# Altium footprint library Footprint.PcbLib: 411 footprints (part 2 of 26)
Each footprint in its own frame and in the unit in brackets; x right, y up, seen from the top. Pads: shape width x height; smd on the part's side, far side on the other; paste and mask are expansions set on the pad; w line width, h text height; cw(c..) or ccw(c..) is an arc to the next point about the centre after c.
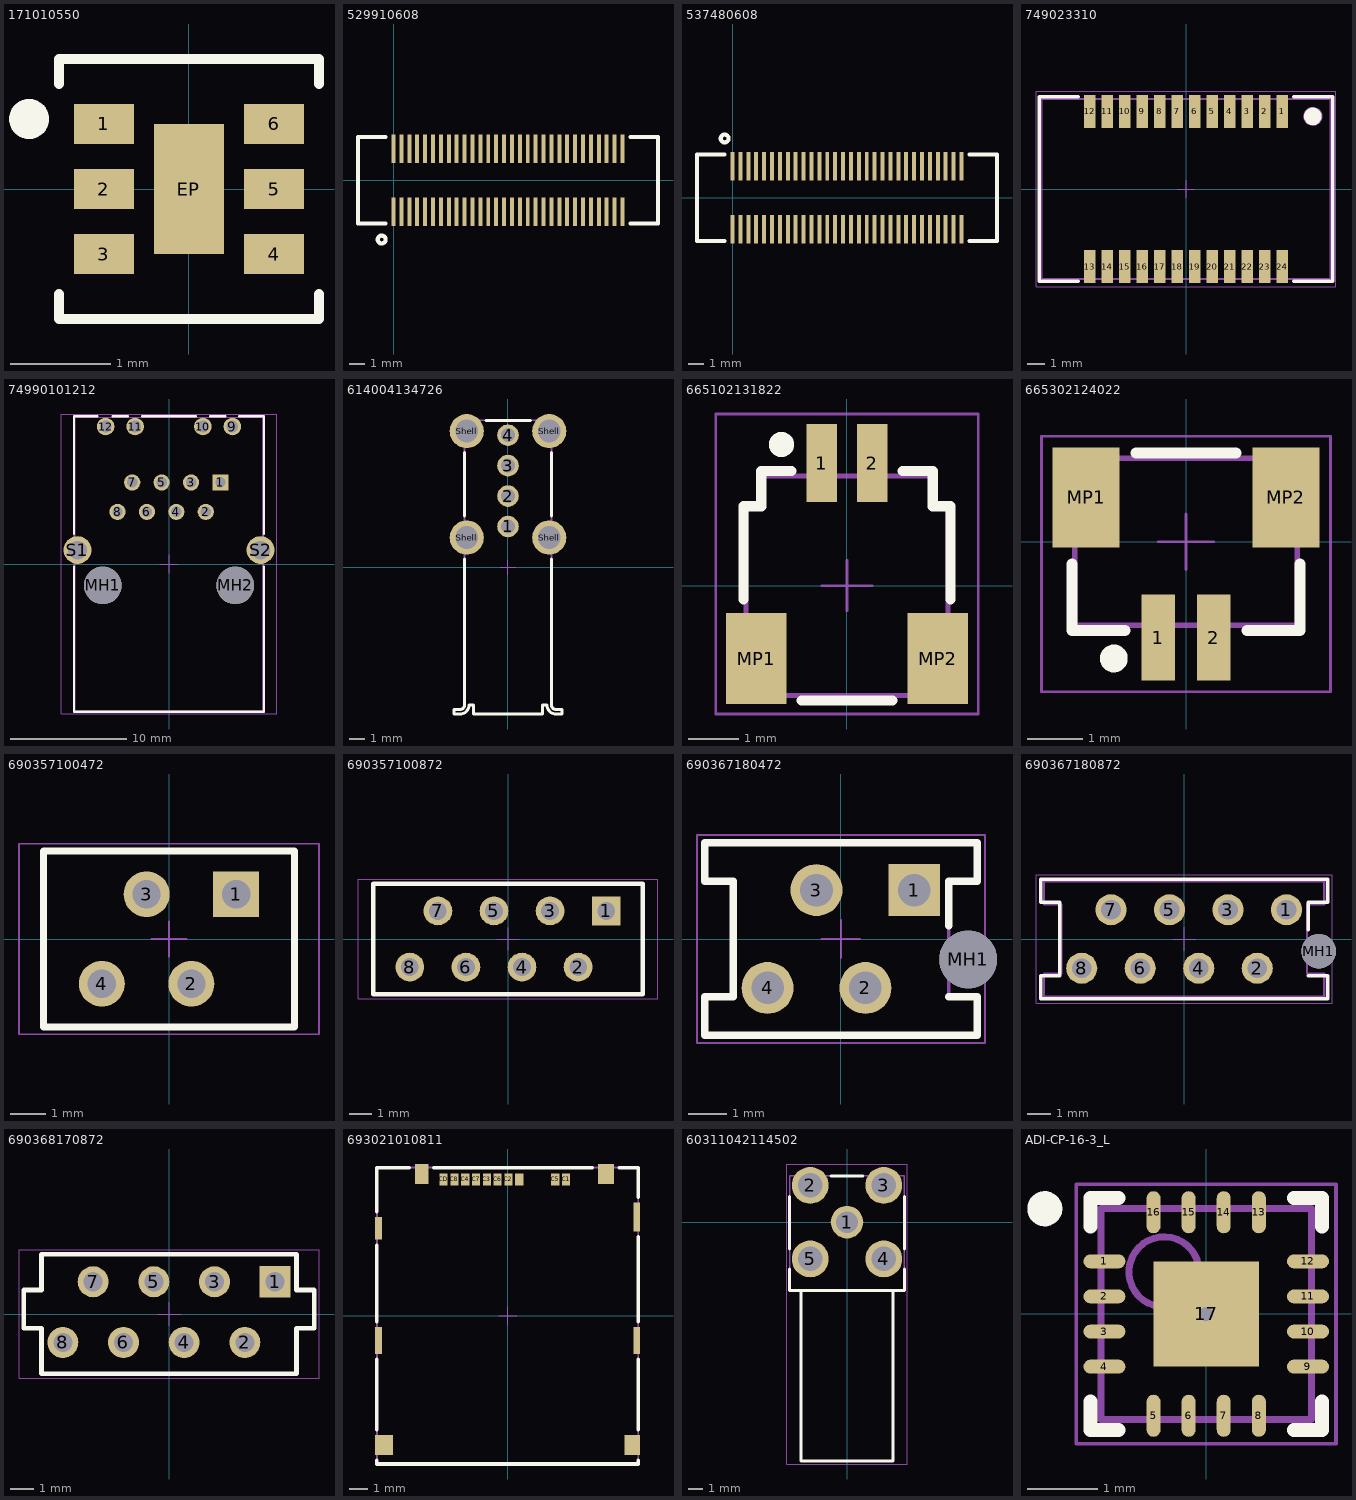
[diagram p1: the footprints below, top view; thin cyan lines are the x and y axes]

## 171010550 [mm] "Variable Step Down MicroModule, body 2.5x2.5mm"
height 1.21
pads (7):
  rect 0.6x0.4 smd: 1(-0.85,0.65) 2(-0.85,0) 3(-0.85,-0.65) 4(0.85,-0.65) 5(0.85,0) 6(0.85,0.65)
  rect 0.7x1.3 smd: EP(0,0)
Top Overlay:
  circle w0.2: c-1.6,0.7 r0.1
  lines w0.1: -1.3,-1.05 -1.3,-1.3 1.3,-1.3 1.3,-1.05 ; -1.3,1.05 -1.3,1.3 1.3,1.3 1.3,1.05
3D body "171010550 (rev1).stp": height 1.21, standoff 0, extent -1.25,-1.25 1.25,1.25

## 529910608 [mm]
pads (60):
  rect 0.25x1.8 smd: 1(0,-2) 2(0,2) 3(0.5,-2) 4(0.5,2) 5(1,-2) 6(1,2) 7(1.5,-2) 8(1.5,2) 9(2,-2) 10(2,2) 11(2.5,-2) 12(2.5,2) 13(3,-2) 14(3,2) 15(3.5,-2) 16(3.5,2) 17(4,-2) 18(4,2) 19(4.5,-2) 20(4.5,2) 21(5,-2) 22(5,2) 23(5.5,-2) 24(5.5,2) 25(6,-2) 26(6,2) 27(6.5,-2) 28(6.5,2) 29(7,-2) 30(7,2) 31(7.5,-2) 32(7.5,2) 33(8,-2) 34(8,2) 35(8.5,-2) 36(8.5,2) 37(9,-2) 38(9,2) 39(9.5,-2) 40(9.5,2) 41(10,-2) 42(10,2) 43(10.5,-2) 44(10.5,2) 45(11,-2) 46(11,2) 47(11.5,-2) 48(11.5,2) 49(12,-2) 50(12,2) 51(12.5,-2) 52(12.5,2) 53(13,-2) 54(13,2) 55(13.5,-2) 56(13.5,2) 57(14,-2) 58(14,2) 59(14.5,-2) 60(14.5,2)
Top Overlay:
  circle w0.254: c-0.75,-3.75 r0.25
  lines w0.254: -0.5,-2.75 -2.25,-2.75 -2.25,2.75 -0.5,2.75 ; 15,-2.75 16.75,-2.75 16.75,2.75 15,2.75
3D body "529910608.stp": height 2.28, standoff -0.01, extent -2.15,-2.7 16.65,2.7

## 537480608 [mm]
pads (60):
  rect 0.25x1.8 smd: 1(0,2) 2(0,-2) 3(0.5,2) 4(0.5,-2) 5(1,2) 6(1,-2) 7(1.5,2) 8(1.5,-2) 9(2,2) 10(2,-2) 11(2.5,2) 12(2.5,-2) 13(3,2) 14(3,-2) 15(3.5,2) 16(3.5,-2) 17(4,2) 18(4,-2) 19(4.5,2) 20(4.5,-2) 21(5,2) 22(5,-2) 23(5.5,2) 24(5.5,-2) 25(6,2) 26(6,-2) 27(6.5,2) 28(6.5,-2) 29(7,2) 30(7,-2) 31(7.5,2) 32(7.5,-2) 33(8,2) 34(8,-2) 35(8.5,2) 36(8.5,-2) 37(9,2) 38(9,-2) 39(9.5,2) 40(9.5,-2) 41(10,2) 42(10,-2) 43(10.5,2) 44(10.5,-2) 45(11,2) 46(11,-2) 47(11.5,2) 48(11.5,-2) 49(12,2) 50(12,-2) 51(12.5,2) 52(12.5,-2) 53(13,2) 54(13,-2) 55(13.5,2) 56(13.5,-2) 57(14,2) 58(14,-2) 59(14.5,2) 60(14.5,-2)
Top Overlay:
  circle w0.254: c-0.5,3.75 r0.25
  lines w0.254: -0.5,-2.75 -2.25,-2.75 -2.25,2.75 -0.5,2.75 ; 15,-2.75 16.75,-2.75 16.75,2.75 15,2.75
3D body "537480608.stp": height 2.4, standoff -0.02, extent -2.15,-2.15 16.65,2.15

## 749023310 [mm] "SMT Transformer, body 16.5x10.3mm"
height 4.1
pads (24):
  rect 0.64x1.88 smd: 1(5.5,4.44) 2(4.5,4.44) 3(3.5,4.44) 4(2.5,4.44) 5(1.5,4.44) 6(0.5,4.44) 7(-0.5,4.44) 8(-1.5,4.44) 9(-2.5,4.44) 10(-3.5,4.44) 11(-4.5,4.44) 12(-5.5,4.44) 13(-5.5,-4.44) 14(-4.5,-4.44) 15(-3.5,-4.44) 16(-2.5,-4.44) 17(-1.5,-4.44) 18(-0.5,-4.44) 19(0.5,-4.44) 20(1.5,-4.44) 21(2.5,-4.44) 22(3.5,-4.44) 23(4.5,-4.44) 24(5.5,-4.44)
Top Overlay:
  circle w0.5: c7.25,4.15 r0.25
  lines w0.2: -6.15,-5.275 -8.375,-5.275 -8.375,5.275 -6.15,5.275 ; 6.15,-5.275 8.375,-5.275 8.375,5.275 6.15,5.275
Mechanical 11:
  circle w0.1: c7.25,4.15 r0.5
  lines w0.1: -8.25,-5.15 8.25,-5.15 8.25,5.15 -8.25,5.15 -8.25,-5.15
  text ".Designator" at -2.5,-0.75 h1.5
Mechanical 15:
  lines w0.05: -0.5,0 0.5,0 ; 0,-0.5 0,0.5 ; -8.575,-5.58 -8.575,5.58 8.575,5.58 8.575,-5.58 -8.575,-5.58
3D body "749023310.stp": height 4.1, standoff 0, extent -8.25,-5.15 8.25,5.15

## 74990101212 [mm] "LAN Transformer, body 25.3x16.2mm"
height 13.5
pads (16):
  rect 1.4x1.4 hole 0.9: 1(4.445,7.04)
  round 1.4 hole 0.9: 2(3.175,4.5) 3(1.905,7.04) 4(0.635,4.5) 5(-0.635,7.04) 6(-1.905,4.5) 7(-3.175,7.04) 8(-4.445,4.5)
  round 1.52 hole 1.02: 9(5.465,11.87) 10(2.925,11.87) 11(-2.925,11.87) 12(-5.465,11.87)
  round 3.25 hole 3.25 unplated: MH1(-5.715,-1.85) MH2(5.715,-1.85)
  round 2.4 hole 1.6: S1(-7.9,1.2) S2(7.9,1.2)
Top Overlay:
  lines w0.2: -8.2,-0.23 -8.2,-12.75 8.2,-12.75 8.2,-0.23 ; -8.2,2.61 -8.2,12.75 -6.18,12.75 ; -4.86,12.75 -3.54,12.75 ; -2.32,12.75 2.32,12.75 ; 3.54,12.75 4.86,12.75 ; 6.06,12.75 8.2,12.75 8.2,2.61
Mechanical 11:
  lines w0.1: -8.1,-12.65 -8.1,12.65 8.1,12.65 8.1,-12.65 -8.1,-12.65
  text ".Designator" at 0,0 h1
Mechanical 13:
  lines w0.1: -8.2,-12.65 -8.2,12.65 8.2,12.65 8.2,-12.65 -8.2,-12.65
Mechanical 15:
  lines w0.1: -0.8,0 0.8,0 ; 0,-0.8 0,0.8 ; -9.3,-12.95 9.3,-12.95 9.3,12.95 -9.3,12.95 -9.3,-12.95
3D body "74990101212.stp": height 13.61, standoff -3.79, extent -8.2,-12.65 8.2,12.65

## 614004134726 [mm] "USB 2.0 Type A Up Right"
height 14.5
pads (8):
  round 1.42 hole 0.92: 1(0,2.68) 2(0,4.68) 3(0,6.68) 4(0,8.68)
  round 2.25 hole 1.5: Shell(-2.71,1.95) Shell(-2.71,8.95) Shell(2.71,1.95) Shell(2.71,8.95)
Top Overlay:
  lines w0.2: -2.86,0.54 -2.86,-9.06 cw(c-3.15,-9.06) -3.15,-9.35 -3.55,-9.35 -3.55,-9.65 -3.15,-9.65 ccw(c-3.15,-9.06) -2.56,-9.06 -2.27,-9.06 -2.27,-9.65 2.27,-9.65 2.27,-9.06 2.56,-9.06 ccw(c3.15,-9.06) 3.15,-9.65 3.55,-9.65 3.55,-9.35 3.15,-9.35 cw(c3.15,-9.06) 2.86,-9.06 2.86,0.54 ; -2.86,3.36 -2.86,7.54 ; -1.46,9.65 1.49,9.65 ; 2.86,3.36 2.86,7.54
Mechanical 13:
  lines w0.1: -3.55,-9.65 -3.15,-9.65 ccw(c-3.15,-9.06) -2.56,-9.06 -2.27,-9.06 -2.27,-9.65 2.27,-9.65 2.27,-9.06 2.56,-9.06 ccw(c3.15,-9.06) 3.15,-9.65 3.55,-9.65 3.55,-9.35 3.15,-9.35 cw(c3.15,-9.06) 2.86,-9.06 2.86,9.65 -2.86,9.65 -2.86,-9.06 cw(c-3.15,-9.06) -3.15,-9.35 -3.55,-9.35 -3.55,-9.65
Mechanical 15:
  lines w0.05: -0.5,0 0.5,0 ; 0,-0.5 0,0.5
3D body "614004134726.stp": height 14.49, standoff -3.82, extent -3.55,-9.65 3.55,9.65

## 665102131822 [mm] "1.00 mm SMT Male Horizontal Shrouded, 2p"
height 3.1
pads (4):
  rect 0.6x1.55 smd: 1(-0.5,2.43) 2(0.5,2.43)
  rect 1.2x1.8 smd: MP1(-1.8,-1.445) MP2(1.8,-1.445)
Top Overlay:
  circle w0.25: c-1.3,2.8 r0.125
  lines w0.2: -2.05,-0.275 -2.05,1.575 -1.7,1.575 -1.7,2.275 -1.1,2.275 ; -0.9,-2.275 0.9,-2.275 ; 1.1,2.275 1.7,2.275 1.7,1.575 2.05,1.575 2.05,-0.275
Mechanical 13:
  lines w0.1: -2,-2.175 -2,1.575 -1.7,1.575 -1.7,2.175 1.7,2.175 1.7,1.575 2,1.575 2,-2.175 -2,-2.175
Mechanical 15:
  lines w0.05: -0.5,0 0.5,0 ; 0,-0.5 0,0.5 ; -2.6,-2.545 -2.6,3.405 2.6,3.405 2.6,-2.545 -2.6,-2.545
3D body "665102131822.stp": height 3.09, standoff -0.01, extent -2,-2.175 2,2.825

## 665302124022 [mm] "1.00 mm SMT Male Vertical Shrouded Header, 2p"
height 3.7
pads (4):
  rect 0.6x1.55 smd: 1(-0.5,-1.725) 2(0.5,-1.725)
  rect 1.2x1.8 smd: MP1(-1.8,0.8) MP2(1.8,0.8)
Top Overlay:
  circle w0.25: c-1.3,-2.1 r0.125
  lines w0.2: -2.05,-0.4 -2.05,-1.6 -1.1,-1.6 ; -0.9,1.6 0.9,1.6 ; 1.1,-1.6 2.05,-1.6 2.05,-0.4
Mechanical 13:
  lines w0.1: -2,-1.5 2,-1.5 2,1.5 -2,1.5 -2,-1.5
Mechanical 15:
  lines w0.05: -0.5,0 0.5,0 ; 0,-0.5 0,0.5 ; -2.6,-2.7 2.6,-2.7 2.6,1.9 -2.6,1.9 -2.6,-2.7
3D body "665302124022.stp": height 4.79, standoff -0.01, extent -2,-2.195 2,1.765

## 690357100472 [mm] "MiniModule Connectors, PCB Type, Male, THT, Vertical, 4p"
height 7.3
pads (4):
  rect 1.3x1.3 hole 0.8: 1(1.905,1.27)
  round 1.3 hole 0.8: 2(0.635,-1.27) 3(-0.635,1.27) 4(-1.905,-1.27)
Top Overlay:
  lines w0.2: -3.555,-2.5 3.555,-2.5 3.555,2.5 -3.555,2.5 -3.555,-2.5
Mechanical 13:
  lines w0.1: -3.555,-2.5 -3.555,2.5 3.555,2.5 3.555,-2.5 -3.555,-2.5
Mechanical 15:
  lines w0.05: -0.5,0 0.5,0 ; 0,-0.5 0,0.5 ; -4.255,-2.7 4.255,-2.7 4.255,2.7 -4.255,2.7 -4.255,-2.7
3D body "690357100472.stp": height 7.05, standoff -3.05, extent -4.055,-2.5 4.055,2.5

## 690357100872 [mm] "MiniModule Connectors, PCB Type, Male, THT, Vertical, 8p"
height 7.3
pads (8):
  rect 1.3x1.3 hole 0.8: 1(4.445,1.27)
  round 1.3 hole 0.8: 2(3.175,-1.27) 3(1.905,1.27) 4(0.635,-1.27) 5(-0.635,1.27) 6(-1.905,-1.27) 7(-3.175,1.27) 8(-4.445,-1.27)
Top Overlay:
  lines w0.2: -6.095,-2.5 -6.095,2.5 6.095,2.5 6.095,-2.5 -6.095,-2.5
Mechanical 13:
  lines w0.1: -6.095,-2.5 6.095,-2.5 6.095,2.5 -6.095,2.5 -6.095,-2.5
Mechanical 15:
  lines w0.05: -0.5,0 0.5,0 ; 0,-0.5 0,0.5 ; -6.795,-2.7 -6.795,2.7 6.795,2.7 6.795,-2.7 -6.795,-2.7
3D body "690357100872.stp": height 7.05, standoff -3.05, extent -6.595,-2.5 6.595,2.5

## 690367180472 [mm] "MiniModule Connectors, PCB Type, Female, THT, Vertical, 4p"
height 4.4
pads (5):
  rect 1.35x1.35 hole 0.85: 1(1.905,1.27)
  round 1.35 hole 0.85: 2(0.635,-1.27) 3(-0.635,1.27) 4(-1.905,-1.27)
  round 1.5 hole 1.5 unplated: MH1(3.305,-0.53)
Top Overlay:
  lines w0.2: 2.8,-1.5 3.54,-1.5 3.54,-2.5 -3.54,-2.5 -3.54,-1.5 -2.8,-1.5 -2.8,1.5 -3.54,1.5 -3.54,2.5 3.54,2.5 3.54,1.5 2.8,1.5 2.8,0.35
Mechanical 13:
  lines w0.1: -3.54,-2.5 3.54,-2.5 3.54,-1.5 2.8,-1.5 2.8,1.5 3.54,1.5 3.54,2.5 -3.54,2.5 -3.54,1.5 -2.8,1.5 -2.8,-1.5 -3.54,-1.5 -3.54,-2.5
Mechanical 15:
  lines w0.05: -0.5,0 0.5,0 ; 0,-0.5 0,0.5 ; -3.74,-2.7 3.74,-2.7 3.74,2.7 -3.74,2.7 -3.74,-2.7
3D body "690367180472.stp": height 4.25, standoff -2.85, extent -3.54,-2.5 3.54,2.5

## 690367180872 [mm] "MiniModule Connectors, PCB Type, Female, THT, Vertical, 8p"
height 4.4
pads (9):
  round 1.35 hole 0.85: 1(4.445,1.27) 2(3.175,-1.27) 3(1.905,1.27) 4(0.635,-1.27) 5(-0.635,1.27) 6(-1.905,-1.27) 7(-3.175,1.27) 8(-4.445,-1.27)
  round 1.5 hole 1.5 unplated: MH1(5.845,-0.53)
Top Overlay:
  lines w0.15: 5.395,-1.6 6.23,-1.6 6.23,-2.6 -6.23,-2.6 -6.23,-1.6 -5.395,-1.6 -5.395,1.6 -6.23,1.6 -6.23,2.6 6.23,2.6 6.23,1.6 5.395,1.6 5.395,0.4
Mechanical 11:
  lines w0.1: -6.08,-2.5 6.08,-2.5 6.08,-1.5 5.34,-1.5 5.34,1.5 6.08,1.5 6.08,2.5 -6.08,2.5 -6.08,1.5 -5.34,1.5 -5.34,-1.5 -6.08,-1.5 -6.08,-2.5
  text ".Designator" at -1.75,-0.75 h1.5
Mechanical 13:
  lines w0.1: -6.08,-2.5 -6.08,-1.5 -5.34,-1.5 -5.34,1.5 -6.08,1.5 -6.08,2.5 6.08,2.5 6.08,1.5 5.34,1.5 5.34,-1.5 6.08,-1.5 6.08,-2.5 -6.08,-2.5
Mechanical 15:
  lines w0.05: -0.5,0 0.5,0 ; 0,-0.5 0,0.5 ; -6.43,-2.8 -6.43,2.8 6.43,2.8 6.43,-2.8 -6.43,-2.8
3D body "690367180872.stp": height 4.25, standoff -2.85, extent -6.08,-2.5 6.08,2.5

## 690368170872 [mm] "MiniModule Connectors, PCB Type, Female, THT, Angled, 8p"
height 6
pads (8):
  rect 1.3x1.3 hole 0.8: 1(4.445,1.35)
  round 1.3 hole 0.8: 2(3.175,-1.19) 3(1.905,1.35) 4(0.635,-1.19) 5(-0.635,1.35) 6(-1.905,-1.19) 7(-3.175,1.35) 8(-4.445,-1.19)
Top Overlay:
  lines w0.2: -6.08,-0.6 -5.34,-0.6 -5.34,-2.5 5.34,-2.5 5.34,-0.6 6.08,-0.6 6.08,1 5.34,1 5.34,2.5 -5.34,2.5 -5.34,1 -6.08,1 -6.08,-0.6
Mechanical 13:
  lines w0.1: -6.08,-0.6 -6.08,1 -5.34,1 -5.34,2.5 5.34,2.5 5.34,1 6.08,1 6.08,-0.6 5.34,-0.6 5.34,-2.5 -5.34,-2.5 -5.34,-0.6 -6.08,-0.6
Mechanical 15:
  lines w0.05: -0.5,0 0.5,0 ; 0,-0.5 0,0.5 ; -6.28,-2.7 -6.28,2.7 6.28,2.7 6.28,-2.7 -6.28,-2.7
3D body "690368170872.stp": height 5.85, standoff -3.05, extent -6.08,-2.5 6.08,2.5

## 693021010811 [mm] "Micro SIM Card Connector (Mega SIM) Push & Push - with Card Detection - 8 Pins"
height 1.4
pads (18):
  rect 0.45x0.68 smd: C1(3.25,7.565) C2(0.05,7.565) C3(-1.15,7.565) C4(-2.35,7.565) C5(2.65,7.565) C6(-0.55,7.565) C7(-1.75,7.565) C8(-2.95,7.565) CD(-3.55,7.565) COM(0.65,7.565)
  rect 0.37x1.5 smd: Shield(-7.165,-1.375) Shield(7.165,-1.375)
  rect 0.37x1.25 smd: Shield(-7.165,4.85)
  rect 1x1.1 smd: Shield(-6.85,-7.175)
  rect 0.75x1.1 smd: Shield(-4.77,7.875)
  rect 0.9x1.1 smd: Shield(5.46,7.875)
  rect 0.85x1.1 smd: Shield(6.925,-7.175)
  rect 0.37x1.6 smd: Shield(7.165,5.485)
Top Overlay:
  lines w0.2: -7.25,-8.025 -7.25,-8.225 7.25,-8.225 ; -7.25,-6.325 -7.25,-2.425 ; -7.25,-0.325 -7.25,3.925 ; -7.25,5.775 -7.25,8.225 ; -5.45,8.225 -7.25,8.225 ; -4.1,8.225 4.7,8.225 ; 6.2,8.225 7.25,8.225 7.25,6.575 ; 7.25,-8.025 7.25,-8.225 ; 7.25,-6.325 7.25,-2.425 ; 7.25,-0.325 7.25,4.375 ; -7.25,8.225 -7.25,8.225 ; 7.25,-8.225 7.25,-8.225
Assembly Top:
  text "No Pattern and Via in this Area" at -6.2,-0.2 h1.02
Mechanical 13:
  lines w0.1: -7.25,8.225 -7.25,8.225 ; -7.25,8.225 -7.25,-8.225 7.25,-8.225 ; -7.25,8.225 7.25,8.225 7.25,-8.225 ; 7.25,-8.225 7.25,-8.225
Mechanical 15:
  lines w0.05: -0.5,0 0.5,0 ; 0,-0.5 0,0.5
3D body "693021010811.stp": height 1.33, standoff -0.01, extent -7.25,-8.359 7.25,8.225

## 60311042114502 [mm] "SMA PCB THT Jack Right Angle  Rear Mount Bulkhead"
height 10.46
pads (5):
  round 2.25 hole 1.5: 1(0,0)
  round 2.55 hole 1.7: 2(-2.54,2.54) 3(2.54,2.54) 4(2.54,-2.54) 5(-2.54,-2.54)
Top Overlay:
  lines w0.2: -3.96,-3.23 -3.96,-4.73 3.96,-4.73 3.96,-3.23 ; -3.96,-1.85 -3.96,1.77 ; -3.175,-4.73 -3.175,-16.5 3.175,-16.5 3.175,-4.73 ; -1.11,3.19 1.09,3.19 ; 3.96,-1.85 3.96,1.77
Mechanical 13:
  lines w0.1: -3.175,-4.73 -3.175,-16.5 3.175,-16.5 3.175,-4.73 ; -3.96,-4.73 3.96,-4.73 3.96,3.19 -3.96,3.19 -3.96,-4.73
Mechanical 15:
  lines w0.05: -0.5,0 0.5,0 ; 0,-0.5 0,0.5 ; -4.16,-16.7 -4.16,4.015 4.16,4.015 4.16,-16.7 -4.16,-16.7
3D body "60311042114502.stp": height 12.2, standoff -3.9, extent -5.1,-16.5 5.1,3.19

## ADI-CP-16-3_L [mm] "QFN, 16-Leads, Body 3x3mm, Pitch 0.5mm, Thermal Pad 1.5x1.5mm, IPC High Density"
height 0.9
pads (17):
  oval 0.6x0.2 smd: 1(-1.45,0.75) 2(-1.45,0.25) 3(-1.45,-0.25) 4(-1.45,-0.75) 9(1.45,-0.75) 10(1.45,-0.25) 11(1.45,0.25) 12(1.45,0.75)
  oval 0.2x0.6 smd: 5(-0.75,-1.45) 6(-0.25,-1.45) 7(0.25,-1.45) 8(0.75,-1.45) 13(0.75,1.45) 14(0.25,1.45) 15(-0.25,1.45) 16(-0.75,1.45)
  rect 1.5x1.5 smd: 17(0,0)
via 0,0 diameter 0.5 hole 0.2
Top Overlay:
  circle w0.25: c-2.3,1.5 r0.125
  lines w0.2: -1.65,-1.25 -1.65,-1.65 -1.25,-1.65 ; -1.65,1.25 -1.65,1.65 -1.25,1.65 ; 1.25,-1.65 1.65,-1.65 1.65,-1.25 ; 1.25,1.65 1.65,1.65 1.65,1.25
Mechanical 13:
  circle w0.1: c-0.6,0.6 r0.5
  lines w0.1: -1.5,-1.5 1.5,-1.5 1.5,1.5 -1.5,1.5 -1.5,-1.5
Mechanical 15:
  lines w0.05: -1.85,-1.85 1.85,-1.85 1.85,1.85 -1.85,1.85 -1.85,-1.85
  lines w0.1: -0.5,0 0.5,0 ; 0,-0.5 0,0.5
3D body: height 0.9, standoff 0, extent -1.5,-1.5 1.5,1.5